# Altium schematic symbol library UCP.SchLib: 378 symbols (part 11 of 14)
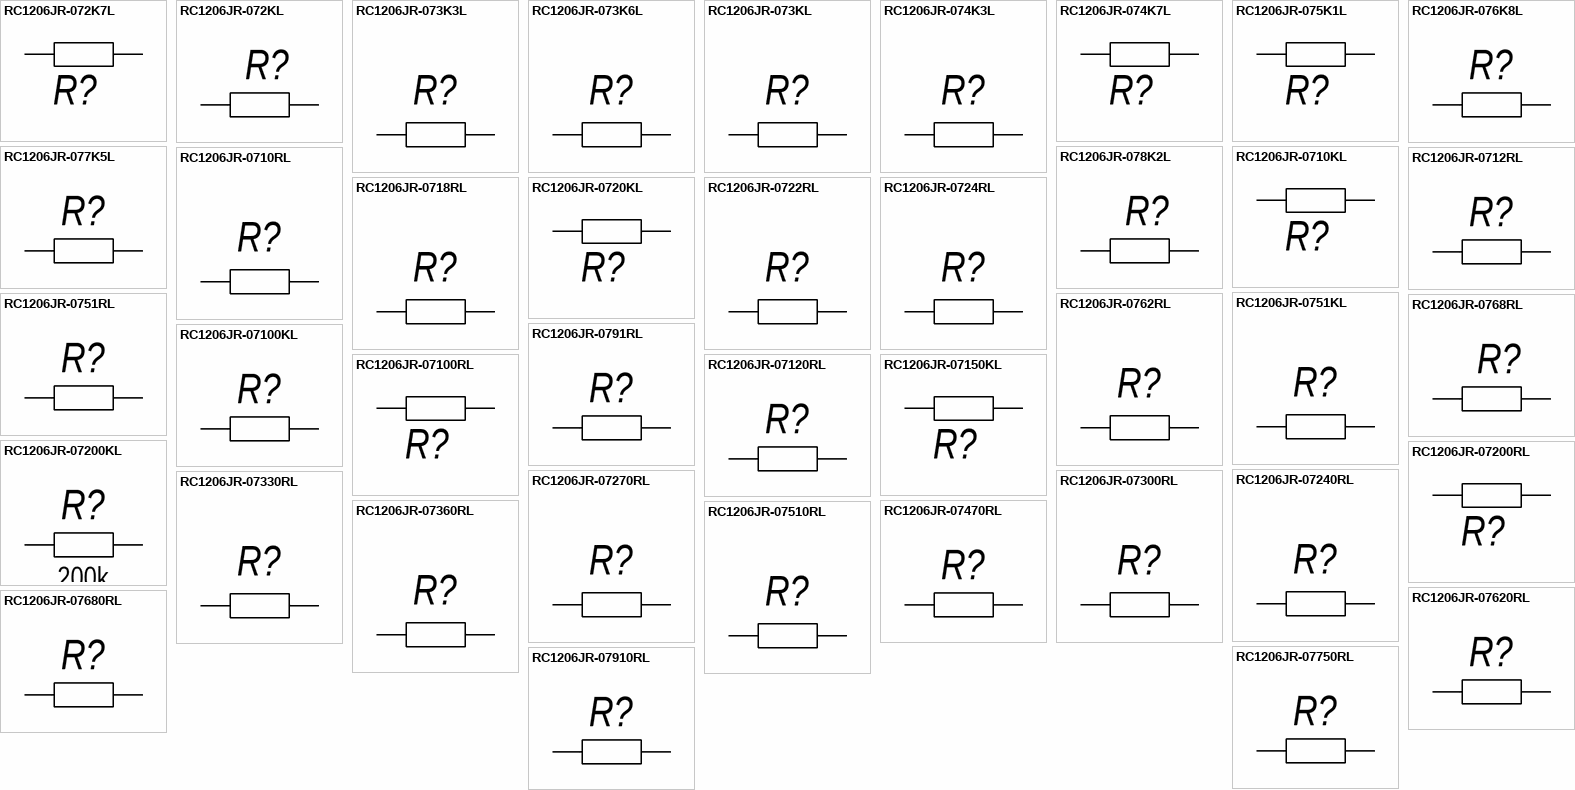
[diagram p34: symbols RC1206JR-072K7L to RC1206JR-07910RL]

## RC1206JR-0720KL
designator R?  (value not drawn)
Chip Resistor Surface Mount 1206 20 кОм; Manufacturer 1: Yageo; Resistance: 100R; Tolerance: 5%; Temperature Coefficient: 100ppm/°C; Power Rating: 250mW; Voltage Rating: 200V; Value: 20k; Manufacturer Part Number 1: RC1206JR-0720KL; RoHS: Yes; Category: Chip SMD Resistors; Stock 1: 16380; Pricing 1: 1=0,12500, 10=0,03000, 25=0,02400, 50=0,01700, 100=0,01100 (USD); Case/Package: 1206; Case Code (Metric): 3216; Case Code (Imperial): 1206; Size Code: 1206; Min Operating Temperature: -55°C; Max Operating Temperature: 155°C; Resistor Type: Thick Film; Packaging: Tape and Reel; Package Quantity: 5000; Number of Terminations: 2; Termination: SMD/SMT; Max Power Dissipation: 250mW; Series: RC1206; Resistance Tolerance: 5%; Construction: Rectangular; Length: 0.122inch; Width: 0.063inch; Height: 0.026inch; Depth: 1.6mm; REACH SVHC: Unknown; Lead Free: Lead Free; Military Standard: Not; RoHS Compliant: Yes; ComponentLink1URL: https://datasheet.ciiva.com/29181/402427-da-01-en-smd-widerstand-chip1206-100-ohm-29181432.pdf?src-supplier=Conrad; ComponentLink1Description: https://datasheet.ciiva.com/29181/402427-da-01-en-smd-widerstand-chip1206-100-ohm-29181432.pdf?src-supplier=Conrad; ComponentLink2URL: https://datasheet.ciiva.com/2458/pyu-rc1206-51-rohs-l-4-2458710.pdf?src-supplier=Digi-Key; ComponentLink2Description: https://datasheet.ciiva.com/2458/pyu-rc1206-51-rohs-l-4-2458710.pdf?src-supplier=Digi-Key; ComponentLink3URL: https://datasheet.ciiva.com/2458/pyu-rc1206-51-rohs-l-4-2458711.pdf?src-supplier=Digi-Key; ComponentLink3Description: https://datasheet.ciiva.com/2458/pyu-rc1206-51-rohs-l-4-2458711.pdf?src-supplier=Digi-Key; ComponentLink4URL: https://datasheet.ciiva.com/2458/pyu-rc1206-51-rohs-l-4-2458712.pdf?src-supplier=Digi-Key; ComponentLink4Description: https://datasheet.ciiva.com/2458/pyu-rc1206-51-rohs-l-4-2458712.pdf?src-supplier=Digi-Key; ComponentLink5URL: https://datasheet.ciiva.com/16772/pyu-rc1206-51-rohs-l-4-16772235.pdf?src-supplier=Future+Electronics; ComponentLink5Description: https://datasheet.ciiva.com/16772/pyu-rc1206-51-rohs-l-4-16772235.pdf?src-supplier=Future+Electronics; Supplier 1: Newark; Supplier Part Number 1: 82AH8588; Contact Plating: Tin,Matte; Voltage Rating (DC): 200V; Features: Moisture Resistant; Radiation Hardening: No; ComponentLink6URL: http://www.yageo.com/documents/recent/PYu-RC_Group_51_RoHS_L_9.pdf?src-supplier=Digi-Key; ComponentLink6Description: http://www.yageo.com/documents/recent/PYu-RC_Group_51_RoHS_L_9.pdf?src-supplier=Digi-Key; ComponentLink7URL: http://www.yageo.com.tw/exep/pages/download/literatures/PYu-R_INT-thick_7.pdf?src-supplier=Digi-Key; ComponentLink7Description: http://www.yageo.com.tw/exep/pages/download/literatures/PYu-R_INT-thick_7.pdf?src-supplier=Digi-Key; ComponentLink8URL: http://www.yageo.com/documents/recent/PYu-RC1206_51_RoHS_L_4.pdf?src-supplier=Mouser; ComponentLink8Description: http://www.yageo.com/documents/recent/PYu-RC1206_51_RoHS_L_4.pdf?src-supplier=Mouser; ComponentLink9URL: http://www.yageo.com/documents/recent/PYu-RC_Group_51_RoHS_L_2.pdf?src-supplier=Avnet; ComponentLink9Description: http://www.yageo.com/documents/recent/PYu-RC_Group_51_RoHS_L_2.pdf?src-supplier=Avnet; ComponentLink10URL: http://www.yageo.com/documents/recent/PYu-RC1206_51_RoHS_L-4.pdf?src-supplier=Future+Electronics; ComponentLink10Description: http://www.yageo.com/documents/recent/PYu-RC1206_51_RoHS_L-4.pdf?src-supplier=Future+Electronics; Mount: SMT; Type: Резистор
footprint RESC310X160X65L40N (Resistor, Chip; 3.10 mm L X 1.60 mm W X 0.65 mm H body)
pins: 1, 2

## RC1206JR-0722RL
designator R?  (value not drawn)
Chip Resistor Surface Mount 1206 22 Ом; Manufacturer 1: Yageo; Tolerance: 5%; Resistance: 22R; Temperature Coefficient: 100ppm/°C; Power Rating: 250mW; Voltage Rating: 200V; Value: 22; Manufacturer Part Number 1: RC1206JR-0722RL; RoHS: Yes; Category: Chip SMD Resistors; Stock 1: 377093; Pricing 1: 1=0,10000, 10=0,06300, 100=0,02580, 1000=0,01158, 2500=0,01005 (USD); Case/Package: 1206; Contact Plating: Tin,Matte; Case Code (Imperial): 1206; Case Code (Metric): 3216; Min Operating Temperature: -55°C; Max Operating Temperature: 155°C; Resistor Type: Thick Film; Package Quantity: 1; Packaging: Tape and Reel; Termination: SMD/SMT; Number of Terminations: 2; Max Power Dissipation: 250mW; Voltage Rating (DC): 200V; Features: Moisture Resistant; Series: RC; Construction: Rectangular; Length: 3.1mm; Width: 1.6mm; Height: 0.026inch; Depth: 1.6mm; Radiation Hardening: No; Military Standard: Not; Lead Free: Lead Free; RoHS Compliant: Yes; Supplier 1: Digi-Key; Working Voltage: 200V; Resistance Tolerance: 5%; Technology: THICK FILM; REACH SVHC: Unknown; ComponentLink1URL: https://datasheet.ciiva.com/29181/402346-da-01-en-smd-widerstand-chip1206-22-ohm-29181583.pdf?src-supplier=Conrad; ComponentLink1Description: https://datasheet.ciiva.com/29181/402346-da-01-en-smd-widerstand-chip1206-22-ohm-29181583.pdf?src-supplier=Conrad; ComponentLink2URL: https://datasheet.ciiva.com/16741/pyu-rc1206-51-rohs-l-4-16741109.pdf?src-supplier=Future+Electronics; ComponentLink2Description: https://datasheet.ciiva.com/16741/pyu-rc1206-51-rohs-l-4-16741109.pdf?src-supplier=Future+Electronics; ComponentLink3URL: https://datasheet.ciiva.com/7857/444357-7857469.pdf?src-supplier=Element14; ComponentLink3Description: https://datasheet.ciiva.com/7857/444357-7857469.pdf?src-supplier=Element14; ComponentLink4URL: https://datasheet.ciiva.com/7857/444357-7857470.pdf?src-supplier=Element14; ComponentLink4Description: https://datasheet.ciiva.com/7857/444357-7857470.pdf?src-supplier=Element14; Supplier Part Number 1: 311-22ERCT-ND; Mount: SMT; Type: Резистор
footprint RESC310X160X65L40N (Resistor, Chip; 3.10 mm L X 1.60 mm W X 0.65 mm H body)
pins: 1, 2

## RC1206JR-0724RL
designator R?  (value not drawn)
Chip Resistor Surface Mount 1206 24 Ом; Manufacturer 1: Yageo; Tolerance: 5%; Resistance: 24R; Temperature Coefficient: 100ppm/°C; Power Rating: 250mW; Voltage Rating: 200V; Value: 24; Supplier 1: Digi-Key; Supplier Part Number 1: 311-24ERCT-ND; Manufacturer Part Number 1: RC1206JR-0724RL; RoHS: Yes; Category: Chip SMD Resistors; Stock 1: 95989; Pricing 1: 1=0,10000, 10=0,06300, 100=0,02580, 1000=0,01158, 2500=0,01005 (USD); Case/Package: 1206; Contact Plating: Tin,Matte; Case Code (Imperial): 1206; Case Code (Metric): 3216; Min Operating Temperature: -55°C; Max Operating Temperature: 155°C; Resistor Type: Thick Film; Package Quantity: 1; Packaging: Tape and Reel; Termination: SMD/SMT; Number of Terminations: 2; Max Power Dissipation: 250mW; Voltage Rating (DC): 200V; Features: Moisture Resistant; Series: RC; Construction: Rectangular; Length: 3.1mm; Width: 1.6mm; Height: 0.026inch; Depth: 1.6mm; Radiation Hardening: No; Military Standard: Not; Lead Free: Lead Free; RoHS Compliant: Yes; ComponentLink1URL: https://datasheet.ciiva.com/2459/pyu-r-int-thick-7-2459115.pdf?src-supplier=Digi-Key; ComponentLink1Description: https://datasheet.ciiva.com/2459/pyu-r-int-thick-7-2459115.pdf?src-supplier=Digi-Key; ComponentLink2URL: https://datasheet.ciiva.com/16742/pyu-rc1206-51-rohs-l-4-16742507.pdf?src-supplier=Future+Electronics; ComponentLink2Description: https://datasheet.ciiva.com/16742/pyu-rc1206-51-rohs-l-4-16742507.pdf?src-supplier=Future+Electronics; ComponentLink3URL: https://datasheet.ciiva.com/2459/pyu-r-int-thick-7-2459116.pdf?src-supplier=Digi-Key; ComponentLink3Description: https://datasheet.ciiva.com/2459/pyu-r-int-thick-7-2459116.pdf?src-supplier=Digi-Key; ComponentLink4URL: https://datasheet.ciiva.com/2459/pyu-r-int-thick-7-2459117.pdf?src-supplier=Digi-Key; ComponentLink4Description: https://datasheet.ciiva.com/2459/pyu-r-int-thick-7-2459117.pdf?src-supplier=Digi-Key; Mount: SMT; Type: Резистор
footprint RESC310X160X65L40N (Resistor, Chip; 3.10 mm L X 1.60 mm W X 0.65 mm H body)
pins: 1, 2

## RC1206JR-0751KL
designator R?  (value not drawn)
Chip Resistor Surface Mount 1206 51 кОм; Manufacturer 1: Yageo; Resistance: 51kR; Tolerance: 5%; Temperature Coefficient: 100ppm/°C; Power Rating: 250mW; Voltage Rating: 200V; Value: 51k; Supplier 1: Digi-Key; Supplier Part Number 1: 311-51KERCT-ND; Manufacturer Part Number 1: RC1206JR-0751KL; RoHS: Yes; Category: Chip SMD Resistors; Stock 1: 45544; Pricing 1: 1=0,10000, 10=0,06300, 100=0,02580, 1000=0,01158, 2500=0,01005 (USD); Case/Package: 1206; Contact Plating: Tin,Matte; Case Code (Imperial): 1206; Case Code (Metric): 3216; Size Code: 1206; Min Operating Temperature: -55°C; Max Operating Temperature: 155°C; Resistor Type: Thick Film; Packaging: Tape and Reel; Termination: SMD/SMT; Voltage Rating (DC): 200V; Features: Moisture Resistant; Series: RC; Max Power Dissipation: 250mW; Number of Terminations: 2; Construction: Rectangular; Length: 3.1mm; Depth: 1.6mm; Radiation Hardening: No; Military Standard: Not; Lead Free: Lead Free; RoHS Compliant: Yes; ComponentLink1URL: https://datasheet.ciiva.com/17055/pyu-rc1206-51-rohs-l-4-17055983.pdf?src-supplier=Future+Electronics; ComponentLink1Description: https://datasheet.ciiva.com/17055/pyu-rc1206-51-rohs-l-4-17055983.pdf?src-supplier=Future+Electronics; Mount: SMT; Type: Резистор
footprint RESC310X160X65L40N (Resistor, Chip; 3.10 mm L X 1.60 mm W X 0.65 mm H body)
pins: 1, 2

## RC1206JR-0751RL
designator R?  (value not drawn)
Chip Resistor Surface Mount 1206 51 Ом; Manufacturer 1: Yageo; Tolerance: 5%; Resistance: 680R; Temperature Coefficient: 100ppm/°C; Power Rating: 250mW; Voltage Rating: 200V; Value: 51; Manufacturer 2: Yageo; Manufacturer Part Number 2: RC1206JR-07680RL; RoHS: Yes; Category: Chip SMD Resistors; Stock 2: 45000; Pricing 2: 1=0,01400, 5000=0,01400 (USD); Case/Package: 1206; Case Code (Metric): 3216; Case Code (Imperial): 1206; Size Code: 1206; Min Operating Temperature: -55°C; Max Operating Temperature: 155°C; Resistor Type: Thick Film; Packaging: Tape and Reel; Package Quantity: 1; Number of Terminations: 2; Termination: SMD/SMT; Max Power Dissipation: 250mW; Features: Moisture Resistant; Series: RC; Construction: Rectangular; Resistance Tolerance: 5%; Length: 0.122inch; Width: 0.063inch; Height: 0.026inch; Depth: 1.6mm; REACH SVHC: Unknown; Lead Free: Lead Free; Military Standard: Not; RoHS Compliant: Yes; ComponentLink1URL: https://datasheet.ciiva.com/29181/402524-da-01-en-smd-widerstand-chip1206-680-ohm-29181458.pdf?src-supplier=Conrad; ComponentLink1Description: https://datasheet.ciiva.com/29181/402524-da-01-en-smd-widerstand-chip1206-680-ohm-29181458.pdf?src-supplier=Conrad; ComponentLink2URL: https://datasheet.ciiva.com/7857/444357-7857525.pdf?src-supplier=Element14; ComponentLink2Description: https://datasheet.ciiva.com/7857/444357-7857525.pdf?src-supplier=Element14; ComponentLink3URL: https://datasheet.ciiva.com/7857/444357-7857526.pdf?src-supplier=Element14; ComponentLink3Description: https://datasheet.ciiva.com/7857/444357-7857526.pdf?src-supplier=Element14; ComponentLink4URL: https://datasheet.ciiva.com/17045/pyu-rc1206-51-rohs-l-4-17045767.pdf?src-supplier=Future+Electronics; ComponentLink4Description: https://datasheet.ciiva.com/17045/pyu-rc1206-51-rohs-l-4-17045767.pdf?src-supplier=Future+Electronics; ComponentLink5URL: https://datasheet.ciiva.com/2458/pyu-r-int-thick-7-2458809.pdf?src-supplier=Digi-Key; ComponentLink5Description: https://datasheet.ciiva.com/2458/pyu-r-int-thick-7-2458809.pdf?src-supplier=Digi-Key; ComponentLink6URL: https://datasheet.ciiva.com/2458/pyu-r-int-thick-7-2458810.pdf?src-supplier=Digi-Key; ComponentLink6Description: https://datasheet.ciiva.com/2458/pyu-r-int-thick-7-2458810.pdf?src-supplier=Digi-Key; ComponentLink7URL: https://datasheet.ciiva.com/2458/pyu-r-int-thick-7-2458811.pdf?src-supplier=Digi-Key; ComponentLink7Description: https://datasheet.ciiva.com/2458/pyu-r-int-thick-7-2458811.pdf?src-supplier=Digi-Key; Supplier 1: Digi-Key; Manufacturer Part Number 1: RC1206JR-0751RL; Stock 1: 243011; Pricing 1: 1=0,10000, 10=0,06300, 100=0,02580, 1000=0,01158, 2500=0,01005 (USD); Voltage Rating (DC): 200V; Working Voltage: 200V; Technology: THICK FILM; ComponentLink8URL: https://datasheet.ciiva.com/16741/pyu-rc1206-51-rohs-l-4-16741110.pdf?src-supplier=Future+Electronics; ComponentLink8Description: https://datasheet.ciiva.com/16741/pyu-rc1206-51-rohs-l-4-16741110.pdf?src-supplier=Future+Electronics; ComponentLink9URL: https://datasheet.ciiva.com/2520/pyu-r-int-thick-7-2520620.pdf?src-supplier=Digi-Key; ComponentLink9Description: https://datasheet.ciiva.com/2520/pyu-r-int-thick-7-2520620.pdf?src-supplier=Digi-Key; ComponentLink10URL: https://datasheet.ciiva.com/2520/pyu-r-int-thick-7-2520621.pdf?src-supplier=Digi-Key; ComponentLink10Description: https://datasheet.ciiva.com/2520/pyu-r-int-thick-7-2520621.pdf?src-supplier=Digi-Key; ComponentLink11URL: https://datasheet.ciiva.com/2520/pyu-r-int-thick-7-2520622.pdf?src-supplier=Digi-Key; ComponentLink11Description: https://datasheet.ciiva.com/2520/pyu-r-int-thick-7-2520622.pdf?src-supplier=Digi-Key; Mount: SMT; Type: Резистор
footprint RESC310X160X65L40N (Resistor, Chip; 3.10 mm L X 1.60 mm W X 0.65 mm H body)
pins: 1, 2

## RC1206JR-0762RL
designator R?  (value not drawn)
Chip Resistor Surface Mount 1206 62 Ом; Manufacturer 1: Yageo; Resistance: 62R; Tolerance: 5%; Temperature Coefficient: 100ppm/°C; Power Rating: 250mW; Voltage Rating: 200V; Value: 62; Supplier 1: Digi-Key; Supplier Part Number 1: 311-62ERCT-ND; Manufacturer Part Number 1: RC1206JR-0762RL; RoHS: Yes; Category: Chip SMD Resistors; Stock 1: 146069; Pricing 1: 1=0,10000, 10=0,06300, 100=0,02580, 1000=0,01158, 2500=0,01005 (USD); Case/Package: 1206; Contact Plating: Tin,Matte; Case Code (Metric): 3216; Case Code (Imperial): 1206; Size Code: 1206; Min Operating Temperature: -55°C; Max Operating Temperature: 155°C; Resistor Type: Thick Film; Package Quantity: 1; Packaging: Tape and Reel; Number of Terminations: 2; Termination: SMD/SMT; Max Power Dissipation: 250mW; Voltage Rating (DC): 200V; Features: Moisture Resistant; Series: RC; Construction: Rectangular; Length: 3.1mm; Width: 0.063inch; Height: 0.026inch; Depth: 1.6mm; Radiation Hardening: No; Military Standard: Not; Lead Free: Lead Free; RoHS Compliant: Yes; ComponentLink1URL: https://datasheet.ciiva.com/2510/pyu-r-int-thick-7-2510368.pdf?src-supplier=Digi-Key; ComponentLink1Description: https://datasheet.ciiva.com/2510/pyu-r-int-thick-7-2510368.pdf?src-supplier=Digi-Key; ComponentLink2URL: https://datasheet.ciiva.com/2510/pyu-r-int-thick-7-2510369.pdf?src-supplier=Digi-Key; ComponentLink2Description: https://datasheet.ciiva.com/2510/pyu-r-int-thick-7-2510369.pdf?src-supplier=Digi-Key; ComponentLink3URL: https://datasheet.ciiva.com/17052/pyu-rc1206-51-rohs-l-4-17052631.pdf?src-supplier=Future+Electronics; ComponentLink3Description: https://datasheet.ciiva.com/17052/pyu-rc1206-51-rohs-l-4-17052631.pdf?src-supplier=Future+Electronics; ComponentLink4URL: https://datasheet.ciiva.com/2510/pyu-r-int-thick-7-2510367.pdf?src-supplier=Digi-Key; ComponentLink4Description: https://datasheet.ciiva.com/2510/pyu-r-int-thick-7-2510367.pdf?src-supplier=Digi-Key; Mount: SMT; Type: Резистор
footprint RESC310X160X65L40N (Resistor, Chip; 3.10 mm L X 1.60 mm W X 0.65 mm H body)
pins: 1, 2

## RC1206JR-0768RL
designator R?  (value not drawn)
Chip Resistor Surface Mount 1206 68 Ом; Manufacturer 1: Yageo; Resistance: 68R; Power Rating: 250mW; Tolerance: 5%; Voltage Rating: 200V; Temperature Coefficient: 100ppm/°C; Value: 68; Supplier 1: Digi-Key; Supplier Part Number 1: 311-68ERCT-ND; Manufacturer Part Number 1: RC1206JR-0768RL; RoHS: Yes; Category: Chip SMD Resistors; Stock 1: 443898; Pricing 1: 1=0,10000, 10=0,06300, 100=0,02580, 1000=0,01158, 2500=0,01005 (USD); Case/Package: 1206; Case Code (Metric): 3216; Case Code (Imperial): 1206; Size Code: 1206; Min Operating Temperature: -55°C; Max Operating Temperature: 155°C; Package Quantity: 1; Packaging: Cut Tape; Resistor Type: Thick Film; Number of Terminations: 2; Termination: SMD/SMT; Max Power Dissipation: 250mW; Series: RC1206; Resistance Tolerance: 5%; Length: 0.122inch; Width: 0.063inch; Height: 0.026inch; REACH SVHC: Unknown; Lead Free: Lead Free; RoHS Compliant: Yes; ComponentLink1URL: https://datasheet.ciiva.com/2458/pyu-r-int-thick-7-2458960.pdf?src-supplier=Digi-Key; ComponentLink1Description: https://datasheet.ciiva.com/2458/pyu-r-int-thick-7-2458960.pdf?src-supplier=Digi-Key; ComponentLink2URL: https://datasheet.ciiva.com/2458/pyu-r-int-thick-7-2458961.pdf?src-supplier=Digi-Key; ComponentLink2Description: https://datasheet.ciiva.com/2458/pyu-r-int-thick-7-2458961.pdf?src-supplier=Digi-Key; ComponentLink3URL: https://datasheet.ciiva.com/7857/444357-7857529.pdf?src-supplier=Element14; ComponentLink3Description: https://datasheet.ciiva.com/7857/444357-7857529.pdf?src-supplier=Element14; ComponentLink4URL: https://datasheet.ciiva.com/7857/444357-7857530.pdf?src-supplier=Element14; ComponentLink4Description: https://datasheet.ciiva.com/7857/444357-7857530.pdf?src-supplier=Element14; ComponentLink5URL: https://datasheet.ciiva.com/2458/pyu-r-int-thick-7-2458959.pdf?src-supplier=Digi-Key; ComponentLink5Description: https://datasheet.ciiva.com/2458/pyu-r-int-thick-7-2458959.pdf?src-supplier=Digi-Key; Mount: SMT; Type: Резистор
footprint RESC310X160X65L40N (Resistor, Chip; 3.10 mm L X 1.60 mm W X 0.65 mm H body)
pins: 1, 2

## RC1206JR-0791RL
designator R?  (value not drawn)
Chip Resistor Surface Mount 1206 91 Ом; Tolerance: 5%; Resistance: 680R; Temperature Coefficient: 100ppm/°C; Power Rating: 250mW; Voltage Rating: 200V; Value: 91; Supplier 1: Digi-Key; Supplier Part Number 1: 311-680ERCT-ND; Supplier 2: Newark; Manufacturer 2: Yageo; Manufacturer Part Number 2: RC1206JR-07680RL; RoHS: Yes; Category: Chip SMD Resistors; Stock 2: 45000; Pricing 2: 1=0,01400, 5000=0,01400 (USD); Case/Package: 1206; Case Code (Metric): 3216; Case Code (Imperial): 1206; Size Code: 1206; Min Operating Temperature: -55°C; Max Operating Temperature: 155°C; Resistor Type: Thick Film; Packaging: Tape and Reel; Package Quantity: 1; Number of Terminations: 2; Termination: SMD/SMT; Max Power Dissipation: 250mW; Features: Moisture Resistant; Series: RC; Construction: Rectangular; Resistance Tolerance: 5%; Length: 0.122inch; Width: 0.063inch; Height: 0.026inch; Depth: 1.6mm; REACH SVHC: Unknown; Lead Free: Lead Free; Military Standard: Not; RoHS Compliant: Yes; ComponentLink1URL: https://datasheet.ciiva.com/29181/402524-da-01-en-smd-widerstand-chip1206-680-ohm-29181458.pdf?src-supplier=Conrad; ComponentLink1Description: https://datasheet.ciiva.com/29181/402524-da-01-en-smd-widerstand-chip1206-680-ohm-29181458.pdf?src-supplier=Conrad; ComponentLink2URL: https://datasheet.ciiva.com/7857/444357-7857525.pdf?src-supplier=Element14; ComponentLink2Description: https://datasheet.ciiva.com/7857/444357-7857525.pdf?src-supplier=Element14; ComponentLink3URL: https://datasheet.ciiva.com/7857/444357-7857526.pdf?src-supplier=Element14; ComponentLink3Description: https://datasheet.ciiva.com/7857/444357-7857526.pdf?src-supplier=Element14; ComponentLink4URL: https://datasheet.ciiva.com/17045/pyu-rc1206-51-rohs-l-4-17045767.pdf?src-supplier=Future+Electronics; ComponentLink4Description: https://datasheet.ciiva.com/17045/pyu-rc1206-51-rohs-l-4-17045767.pdf?src-supplier=Future+Electronics; ComponentLink5URL: https://datasheet.ciiva.com/2458/pyu-r-int-thick-7-2458809.pdf?src-supplier=Digi-Key; ComponentLink5Description: https://datasheet.ciiva.com/2458/pyu-r-int-thick-7-2458809.pdf?src-supplier=Digi-Key; ComponentLink6URL: https://datasheet.ciiva.com/2458/pyu-r-int-thick-7-2458810.pdf?src-supplier=Digi-Key; ComponentLink6Description: https://datasheet.ciiva.com/2458/pyu-r-int-thick-7-2458810.pdf?src-supplier=Digi-Key; ComponentLink7URL: https://datasheet.ciiva.com/2458/pyu-r-int-thick-7-2458811.pdf?src-supplier=Digi-Key; ComponentLink7Description: https://datasheet.ciiva.com/2458/pyu-r-int-thick-7-2458811.pdf?src-supplier=Digi-Key; Supplier Part Number 2: 12AC2296; Supplier 3: Newark; Supplier Part Number 3: 82AH8622; Manufacturer 3: Yageo; Manufacturer Part Number 3: RC1206JR-0791RL; Stock 3: 5450; Pricing 3: 1=0,12500, 10=0,03000, 25=0,02400, 50=0,01700, 100=0,01100 (USD); Contact Plating: Tin,Matte; Weight: 0.000571oz; Voltage Rating (DC): 200V; Radiation Hardening: No; ComponentLink8URL: https://datasheet.ciiva.com/2458/pyu-r-int-thick-7-2458690.pdf?src-supplier=Digi-Key; ComponentLink8Description: https://datasheet.ciiva.com/2458/pyu-r-int-thick-7-2458690.pdf?src-supplier=Digi-Key; ComponentLink9URL: https://datasheet.ciiva.com/2458/pyu-r-int-thick-7-2458691.pdf?src-supplier=Digi-Key; ComponentLink9Description: https://datasheet.ciiva.com/2458/pyu-r-int-thick-7-2458691.pdf?src-supplier=Digi-Key; ComponentLink10URL: https://datasheet.ciiva.com/2458/pyu-r-int-thick-7-2458689.pdf?src-supplier=Digi-Key; ComponentLink10Description: https://datasheet.ciiva.com/2458/pyu-r-int-thick-7-2458689.pdf?src-supplier=Digi-Key; ComponentLink11URL: https://datasheet.ciiva.com/17014/pyu-rc1206-51-rohs-l-4-17014926.pdf?src-supplier=Future+Electronics; ComponentLink11Description: https://datasheet.ciiva.com/17014/pyu-rc1206-51-rohs-l-4-17014926.pdf?src-supplier=Future+Electronics; Mount: SMT; Type: Резистор
footprint RESC310X160X65L40N (Resistor, Chip; 3.10 mm L X 1.60 mm W X 0.65 mm H body)
pins: 1, 2

## RC1206JR-07100KL
designator R?  (value not drawn)
Chip Resistor Surface Mount 1206 100 кОм; Manufacturer 1: Yageo; Power Rating: 250mW; Tolerance: 5%; Resistance: 100kR; Voltage Rating: 200V; Temperature Coefficient: 100ppm/°C; Value: 100k; Supplier 1: Digi-Key; Supplier Part Number 1: 311-100KERCT-ND; Manufacturer Part Number 1: RC1206JR-07100KL; RoHS: Yes; Category: Chip SMD Resistors; Stock 1: 192055; Pricing 1: 1=0,10000, 10=0,06300, 100=0,02580, 1000=0,01158, 2500=0,01005 (USD); Case/Package: 1206; Case Code (Imperial): 1206; Case Code (Metric): 3216; Size Code: 1206; Min Operating Temperature: -55°C; Max Operating Temperature: 155°C; Resistor Type: Thick Film; Packaging: Tape and Reel; Package Quantity: 1; Termination: SMD/SMT; Number of Terminations: 2; Max Power Dissipation: 250mW; Features: Moisture Resistant; Series: RC; Construction: Rectangular; Resistance Tolerance: 5%; Length: 0.122inch; Width: 0.063inch; Height: 0.026inch; Depth: 1.6mm; REACH SVHC: Unknown; Military Standard: Not; Lead Free: Lead Free; RoHS Compliant: Yes; ComponentLink1URL: https://datasheet.ciiva.com/29181/402788-da-01-en-smd-widerstand-chip1206-100-kohm-29181395.pdf?src-supplier=Conrad; ComponentLink1Description: https://datasheet.ciiva.com/29181/402788-da-01-en-smd-widerstand-chip1206-100-kohm-29181395.pdf?src-supplier=Conrad; ComponentLink2URL: https://datasheet.ciiva.com/2458/pyu-rc1206-51-rohs-l-4-2458650.pdf?src-supplier=Digi-Key; ComponentLink2Description: https://datasheet.ciiva.com/2458/pyu-rc1206-51-rohs-l-4-2458650.pdf?src-supplier=Digi-Key; ComponentLink3URL: https://datasheet.ciiva.com/2458/pyu-rc1206-51-rohs-l-4-2458651.pdf?src-supplier=Digi-Key; ComponentLink3Description: https://datasheet.ciiva.com/2458/pyu-rc1206-51-rohs-l-4-2458651.pdf?src-supplier=Digi-Key; ComponentLink4URL: https://datasheet.ciiva.com/2458/pyu-rc1206-51-rohs-l-4-2458652.pdf?src-supplier=Digi-Key; ComponentLink4Description: https://datasheet.ciiva.com/2458/pyu-rc1206-51-rohs-l-4-2458652.pdf?src-supplier=Digi-Key; ComponentLink5URL: https://datasheet.ciiva.com/16769/pyu-rc1206-51-rohs-l-4-16769645.pdf?src-supplier=Future+Electronics; ComponentLink5Description: https://datasheet.ciiva.com/16769/pyu-rc1206-51-rohs-l-4-16769645.pdf?src-supplier=Future+Electronics; ComponentLink6URL: https://datasheet.ciiva.com/7857/444357-7857423.pdf?src-supplier=Element14; ComponentLink6Description: https://datasheet.ciiva.com/7857/444357-7857423.pdf?src-supplier=Element14; Mount: SMT; Type: Резистор
footprint RESC310X160X65L40N (Resistor, Chip; 3.10 mm L X 1.60 mm W X 0.65 mm H body)
pins: 1, 2

## RC1206JR-07100RL
designator R?  (value not drawn)
Chip Resistor Surface Mount 1206 100 Ом; Manufacturer 1: Yageo; Resistance: 100R; Tolerance: 5%; Temperature Coefficient: 100ppm/°C; Power Rating: 250mW; Voltage Rating: 200V; Value: 100; Supplier 1: Digi-Key; Supplier Part Number 1: 311-100ERCT-ND; Manufacturer Part Number 1: RC1206JR-07100RL; RoHS: Yes; Category: Chip SMD Resistors; Stock 1: 1228470; Pricing 1: 1=0,10000, 10=0,06300, 100=0,02580, 1000=0,01158, 2500=0,01005 (USD); Case/Package: 1206; Case Code (Metric): 3216; Case Code (Imperial): 1206; Size Code: 1206; Min Operating Temperature: -55°C; Max Operating Temperature: 155°C; Resistor Type: Thick Film; Packaging: Tape and Reel; Package Quantity: 5000; Number of Terminations: 2; Termination: SMD/SMT; Max Power Dissipation: 250mW; Series: RC1206; Resistance Tolerance: 5%; Construction: Rectangular; Length: 0.122inch; Width: 0.063inch; Height: 0.026inch; Depth: 1.6mm; REACH SVHC: Unknown; Lead Free: Lead Free; Military Standard: Not; RoHS Compliant: Yes; ComponentLink1URL: https://datasheet.ciiva.com/29181/402427-da-01-en-smd-widerstand-chip1206-100-ohm-29181432.pdf?src-supplier=Conrad; ComponentLink1Description: https://datasheet.ciiva.com/29181/402427-da-01-en-smd-widerstand-chip1206-100-ohm-29181432.pdf?src-supplier=Conrad; ComponentLink2URL: https://datasheet.ciiva.com/2458/pyu-rc1206-51-rohs-l-4-2458710.pdf?src-supplier=Digi-Key; ComponentLink2Description: https://datasheet.ciiva.com/2458/pyu-rc1206-51-rohs-l-4-2458710.pdf?src-supplier=Digi-Key; ComponentLink3URL: https://datasheet.ciiva.com/2458/pyu-rc1206-51-rohs-l-4-2458711.pdf?src-supplier=Digi-Key; ComponentLink3Description: https://datasheet.ciiva.com/2458/pyu-rc1206-51-rohs-l-4-2458711.pdf?src-supplier=Digi-Key; ComponentLink4URL: https://datasheet.ciiva.com/2458/pyu-rc1206-51-rohs-l-4-2458712.pdf?src-supplier=Digi-Key; ComponentLink4Description: https://datasheet.ciiva.com/2458/pyu-rc1206-51-rohs-l-4-2458712.pdf?src-supplier=Digi-Key; ComponentLink5URL: https://datasheet.ciiva.com/16772/pyu-rc1206-51-rohs-l-4-16772235.pdf?src-supplier=Future+Electronics; ComponentLink5Description: https://datasheet.ciiva.com/16772/pyu-rc1206-51-rohs-l-4-16772235.pdf?src-supplier=Future+Electronics; Mount: SMT; Type: Резистор
footprint RESC310X160X65L40N (Resistor, Chip; 3.10 mm L X 1.60 mm W X 0.65 mm H body)
pins: 1, 2

## RC1206JR-07120RL
designator R?  (value not drawn)
Chip Resistor Surface Mount 1206 120 Ом; Resistance: 100R; Tolerance: 5%; Temperature Coefficient: 100ppm/°C; Power Rating: 250mW; Voltage Rating: 200V; Value: 120; Supplier 1: Digi-Key; Supplier Part Number 1: 311-120ERCT-ND; Supplier 2: Digi-Key; Manufacturer 2: Yageo; Manufacturer Part Number 2: RC1206JR-07100RL; RoHS: Yes; Category: Chip SMD Resistors; Stock 2: 1228470; Pricing 2: 1=0,10000, 10=0,06300, 100=0,02580, 1000=0,01158, 2500=0,01005 (USD); Case/Package: 1206; Case Code (Metric): 3216; Case Code (Imperial): 1206; Size Code: 1206; Min Operating Temperature: -55°C; Max Operating Temperature: 155°C; Resistor Type: Thick Film; Packaging: Tape and Reel; Package Quantity: 5000; Number of Terminations: 2; Termination: SMD/SMT; Max Power Dissipation: 250mW; Series: RC1206; Resistance Tolerance: 5%; Construction: Rectangular; Length: 0.122inch; Width: 0.063inch; Height: 0.026inch; Depth: 1.6mm; REACH SVHC: Unknown; Lead Free: Lead Free; Military Standard: Not; RoHS Compliant: Yes; ComponentLink1URL: https://datasheet.ciiva.com/29181/402427-da-01-en-smd-widerstand-chip1206-100-ohm-29181432.pdf?src-supplier=Conrad; ComponentLink1Description: https://datasheet.ciiva.com/29181/402427-da-01-en-smd-widerstand-chip1206-100-ohm-29181432.pdf?src-supplier=Conrad; ComponentLink2URL: https://datasheet.ciiva.com/2458/pyu-rc1206-51-rohs-l-4-2458710.pdf?src-supplier=Digi-Key; ComponentLink2Description: https://datasheet.ciiva.com/2458/pyu-rc1206-51-rohs-l-4-2458710.pdf?src-supplier=Digi-Key; ComponentLink3URL: https://datasheet.ciiva.com/2458/pyu-rc1206-51-rohs-l-4-2458711.pdf?src-supplier=Digi-Key; ComponentLink3Description: https://datasheet.ciiva.com/2458/pyu-rc1206-51-rohs-l-4-2458711.pdf?src-supplier=Digi-Key; ComponentLink4URL: https://datasheet.ciiva.com/2458/pyu-rc1206-51-rohs-l-4-2458712.pdf?src-supplier=Digi-Key; ComponentLink4Description: https://datasheet.ciiva.com/2458/pyu-rc1206-51-rohs-l-4-2458712.pdf?src-supplier=Digi-Key; ComponentLink5URL: https://datasheet.ciiva.com/16772/pyu-rc1206-51-rohs-l-4-16772235.pdf?src-supplier=Future+Electronics; ComponentLink5Description: https://datasheet.ciiva.com/16772/pyu-rc1206-51-rohs-l-4-16772235.pdf?src-supplier=Future+Electronics; Supplier Part Number 2: 311-100ERCT-ND; Mount: SMT; Type: Резистор
footprint RESC310X160X65L40N (Resistor, Chip; 3.10 mm L X 1.60 mm W X 0.65 mm H body)
pins: 1, 2

## RC1206JR-07150KL
designator R?  (value not drawn)
Chip Resistor Surface Mount 1206 150 кОм; Manufacturer 1: Yageo; Power Rating: 250mW; Tolerance: 5%; Voltage Rating: 200V; Resistance: 150kR; Temperature Coefficient: 100ppm/°C; Value: 150k; Supplier 1: Digi-Key; Supplier Part Number 1: 311-150KERCT-ND; Manufacturer Part Number 1: RC1206JR-07150KL; RoHS: Yes; Category: Chip SMD Resistors; Stock 1: 3922; Pricing 1: 1=0,10000, 10=0,06300, 100=0,02580, 1000=0,01158, 2500=0,01005 (USD); Case/Package: 1206; Number of Pins: 2; Case Code (Imperial): 1206; Case Code (Metric): 3216; Size Code: 1206; Min Operating Temperature: -55°C; Max Operating Temperature: 155°C; Voltage Rating (DC): 200V; Packaging: Tape and Reel; Termination: SMD/SMT; Resistor Type: Thick Film; Features: Moisture Resistant; Series: RC; Max Power Dissipation: 250mW; Number of Terminations: 2; Construction: Rectangular; Resistance Tolerance: 5%; Length: 3.1mm; Width: 1.6mm; Height: 0.55mm; Depth: 1.6mm; REACH SVHC: No SVHC; Military Standard: Not; Lead Free: Lead Free; RoHS Compliant: Yes; ComponentLink1URL: https://datasheet.ciiva.com/16746/pyu-rc1206-51-rohs-l-4-16746876.pdf?src-supplier=Future+Electronics; ComponentLink1Description: https://datasheet.ciiva.com/16746/pyu-rc1206-51-rohs-l-4-16746876.pdf?src-supplier=Future+Electronics; ComponentLink2URL: https://datasheet.ciiva.com/7857/444357-7857439.pdf?src-supplier=Element14; ComponentLink2Description: https://datasheet.ciiva.com/7857/444357-7857439.pdf?src-supplier=Element14; Mount: SMT; Type: Резистор
footprint RESC310X160X65L40N (Resistor, Chip; 3.10 mm L X 1.60 mm W X 0.65 mm H body)
pins: 1, 2

## RC1206JR-07200KL
designator R?  value 200k  (hidden comment: RC1206JR-07200KL)
Chip Resistor Surface Mount 1206 200 кОм; Manufacturer 1: Yageo; Resistance: 200kR; Power Rating: 250mW; Tolerance: 5%; Temperature Coefficient: 100ppm/°C; Voltage Rating (DC): 400V; Supplier 1: Arrow Electronics; Supplier Part Number 1: RC1206JR-07200KL; Manufacturer Part Number 1: RC1206JR-07200KL; RoHS 1: Yes; Category: Chip SMD Resistors; Stock 1: 45000; Pricing 1: 5000=0,00440 (USD); Case/Package: 1206; Case Code (Metric): 3216; Case Code (Imperial): 1206; Size Code: 1206; Min Operating Temperature: -55°C; Max Operating Temperature: 155°C; Package Quantity: 1; Packaging: Tape and Reel; Resistor Type: Thick Film; Number of Terminations: 2; Max Power Dissipation: 250mW; Features: Moisture Resistant; Series: RC; Construction: Rectangular; Length: 0.122inch; Width: 0.063inch; Height: 0.026inch; Depth: 1.6mm; Military Standard: Not; Lead Free: Lead Free; RoHS Compliant: Yes; ComponentLink1URL: https://datasheet.ciiva.com/2520/pyu-r-int-thick-7-2520645.pdf?src-supplier=Digi-Key; ComponentLink1Description: https://datasheet.ciiva.com/2520/pyu-r-int-thick-7-2520645.pdf?src-supplier=Digi-Key; ComponentLink2URL: https://datasheet.ciiva.com/2520/pyu-r-int-thick-7-2520646.pdf?src-supplier=Digi-Key; ComponentLink2Description: https://datasheet.ciiva.com/2520/pyu-r-int-thick-7-2520646.pdf?src-supplier=Digi-Key; ComponentLink3URL: https://datasheet.ciiva.com/16746/pyu-rc1206-51-rohs-l-4-16746043.pdf?src-supplier=Future+Electronics; ComponentLink3Description: https://datasheet.ciiva.com/16746/pyu-rc1206-51-rohs-l-4-16746043.pdf?src-supplier=Future+Electronics; Mount: SMT; Type: Резистор
footprint RESC310X160X65L40N (Resistor, Chip; 3.10 mm L X 1.60 mm W X 0.65 mm H body)
pins: 1, 2

## RC1206JR-07200RL
designator R?  (value not drawn)
Chip Resistor Surface Mount 1206 200 Ом; Manufacturer 1: Yageo; Manufacturer Part Number 1: RC1206JR-07100RL; Resistance: 100R; Tolerance: 5%; Temperature Coefficient: 100ppm/°C; Power Rating: 250mW; Voltage Rating: 200V; Value: 200; RoHS: Yes; Category: Chip SMD Resistors; Stock 1: 1228470; Pricing 1: 1=0,10000, 10=0,06300, 100=0,02580, 1000=0,01158, 2500=0,01005 (USD); Case/Package: 1206; Case Code (Metric): 3216; Case Code (Imperial): 1206; Size Code: 1206; Min Operating Temperature: -55°C; Max Operating Temperature: 155°C; Resistor Type: Thick Film; Packaging: Tape and Reel; Package Quantity: 5000; Number of Terminations: 2; Termination: SMD/SMT; Max Power Dissipation: 250mW; Series: RC1206; Resistance Tolerance: 5%; Construction: Rectangular; Length: 0.122inch; Width: 0.063inch; Height: 0.026inch; Depth: 1.6mm; REACH SVHC: Unknown; Lead Free: Lead Free; Military Standard: Not; RoHS Compliant: Yes; ComponentLink1URL: https://datasheet.ciiva.com/29181/402427-da-01-en-smd-widerstand-chip1206-100-ohm-29181432.pdf?src-supplier=Conrad; ComponentLink1Description: https://datasheet.ciiva.com/29181/402427-da-01-en-smd-widerstand-chip1206-100-ohm-29181432.pdf?src-supplier=Conrad; ComponentLink2URL: https://datasheet.ciiva.com/2458/pyu-rc1206-51-rohs-l-4-2458710.pdf?src-supplier=Digi-Key; ComponentLink2Description: https://datasheet.ciiva.com/2458/pyu-rc1206-51-rohs-l-4-2458710.pdf?src-supplier=Digi-Key; ComponentLink3URL: https://datasheet.ciiva.com/2458/pyu-rc1206-51-rohs-l-4-2458711.pdf?src-supplier=Digi-Key; ComponentLink3Description: https://datasheet.ciiva.com/2458/pyu-rc1206-51-rohs-l-4-2458711.pdf?src-supplier=Digi-Key; ComponentLink4URL: https://datasheet.ciiva.com/2458/pyu-rc1206-51-rohs-l-4-2458712.pdf?src-supplier=Digi-Key; ComponentLink4Description: https://datasheet.ciiva.com/2458/pyu-rc1206-51-rohs-l-4-2458712.pdf?src-supplier=Digi-Key; ComponentLink5URL: https://datasheet.ciiva.com/16772/pyu-rc1206-51-rohs-l-4-16772235.pdf?src-supplier=Future+Electronics; ComponentLink5Description: https://datasheet.ciiva.com/16772/pyu-rc1206-51-rohs-l-4-16772235.pdf?src-supplier=Future+Electronics; Mount: SMT; Type: Резистор
footprint RESC310X160X65L40N (Resistor, Chip; 3.10 mm L X 1.60 mm W X 0.65 mm H body)
pins: 1, 2

## RC1206JR-07240RL
designator R?  (value not drawn)
Chip Resistor Surface Mount 1206 240 Ом; Manufacturer 1: Yageo; Tolerance: 5%; Power Rating: 250mW; Resistance: 240R; Voltage Rating: 200V; Temperature Coefficient: 100ppm/°C; Value: 240; Supplier 1: Digi-Key; Supplier Part Number 1: 311-240ERCT-ND; Manufacturer Part Number 1: RC1206JR-07240RL; RoHS: Yes; Category: Chip SMD Resistors; Stock 1: 20201; Pricing 1: 1=0,10000, 10=0,06300, 100=0,02580, 1000=0,01158, 2500=0,01005 (USD); Case/Package: 1206; Case Code (Imperial): 1206; Case Code (Metric): 3216; Size Code: 1206; Min Operating Temperature: -55°C; Max Operating Temperature: 155°C; Packaging: Tape and Reel; Package Quantity: 5000; Termination: SMD/SMT; Resistor Type: Thick Film; Voltage Rating (DC): 200V; Features: Moisture Resistant; Series: RC; Max Power Dissipation: 250mW; Number of Terminations: 2; Construction: Rectangular; Length: 3.1mm; Width: 1.6mm; Height: 0.55mm; Depth: 1.6mm; Military Standard: Not; Lead Free: Lead Free; RoHS Compliant: Yes; ComponentLink1URL: http://www.mouser.com/ds/2/447/PYu-RC1206_51_RoHS_L-4-349080.pdf?src-supplier=Mouser; ComponentLink1Description: http://www.mouser.com/ds/2/447/PYu-RC1206_51_RoHS_L-4-349080.pdf?src-supplier=Mouser; ComponentLink2URL: http://components.arrow.com/part/dataview/0323_03543372?src-supplier=Arrow+Europe; ComponentLink2Description: http://components.arrow.com/part/dataview/0323_03543372?src-supplier=Arrow+Europe; ComponentLink3URL: http://www.yageo.com/documents/recent/PYu-RC1206_51_RoHS_L-4.pdf?src-supplier=Future+Electronics; ComponentLink3Description: http://www.yageo.com/documents/recent/PYu-RC1206_51_RoHS_L-4.pdf?src-supplier=Future+Electronics; ComponentLink4URL: http://www.yageo.com/documents/recent/PYu-RC_Group_51_RoHS_L_9.pdf?src-supplier=Digi-Key; ComponentLink4Description: http://www.yageo.com/documents/recent/PYu-RC_Group_51_RoHS_L_9.pdf?src-supplier=Digi-Key; ComponentLink5URL: http://www.yageo.com/documents/recent/PYu-RC_Group_51_RoHS_L_10.pdf?src-supplier=Digi-Key; ComponentLink5Description: http://www.yageo.com/documents/recent/PYu-RC_Group_51_RoHS_L_10.pdf?src-supplier=Digi-Key; ComponentLink6URL: http://www.yageo.com.tw/exep/pages/download/literatures/PYu-R_INT-thick_7.pdf?src-supplier=Digi-Key; ComponentLink6Description: http://www.yageo.com.tw/exep/pages/download/literatures/PYu-R_INT-thick_7.pdf?src-supplier=Digi-Key; Mount: SMT; Type: Резистор
footprint RESC310X160X65L40N (Resistor, Chip; 3.10 mm L X 1.60 mm W X 0.65 mm H body)
pins: 1, 2

## RC1206JR-07270RL
designator R?  (value not drawn)
Chip Resistor Surface Mount 1206 270 Ом; Manufacturer 1: Yageo; Resistance: 270R; Tolerance: 5%; Temperature Coefficient: 100ppm/°C; Power Rating: 250mW; Voltage Rating: 200V; Value: 270; Supplier 1: Digi-Key; Supplier Part Number 1: 311-270ERCT-ND; Manufacturer Part Number 1: RC1206JR-07270RL; RoHS: Yes; Category: Chip SMD Resistors; Stock 1: 33; Pricing 1: 1=0,10000, 10=0,06300, 100=0,02580, 1000=0,01158, 2500=0,01005 (USD); Case/Package: 1206; Contact Plating: Tin,Matte; Case Code (Imperial): 1206; Case Code (Metric): 3216; Size Code: 1206; Min Operating Temperature: -55°C; Max Operating Temperature: 155°C; Resistor Type: Thick Film; Packaging: Tape and Reel; Termination: SMD/SMT; Features: Moisture Resistant; Series: RC; Max Power Dissipation: 250mW; Number of Terminations: 2; Resistance Tolerance: 5%; Construction: Rectangular; Length: 3.1mm; Depth: 1.6mm; Radiation Hardening: No; REACH SVHC: Unknown; Military Standard: Not; Lead Free: Lead Free; RoHS Compliant: Yes; ComponentLink1URL: https://datasheet.ciiva.com/29181/402478-da-01-en-smd-widerstand-chip1206-270-ohm-29181445.pdf?src-supplier=Conrad; ComponentLink1Description: https://datasheet.ciiva.com/29181/402478-da-01-en-smd-widerstand-chip1206-270-ohm-29181445.pdf?src-supplier=Conrad; Mount: SMT; Type: Резистор
footprint RESC310X160X65L40N (Resistor, Chip; 3.10 mm L X 1.60 mm W X 0.65 mm H body)
pins: 1, 2

## RC1206JR-07300RL
designator R?  (value not drawn)
Chip Resistor Surface Mount 1206 300 Ом; Manufacturer 1: Yageo; Power Rating: 250mW; Resistance: 300R; Tolerance: 5%; Voltage Rating: 200V; Temperature Coefficient: 100ppm/°C; Voltage Rating (DC): 400V; Value: 300; Supplier 1: Digi-Key; Supplier Part Number 1: 311-300ERCT-ND; Manufacturer Part Number 1: RC1206JR-07300RL; RoHS: Yes; Category: Chip SMD Resistors; Stock 1: 38660; Pricing 1: 1=0,10000, 10=0,06300, 100=0,02580, 1000=0,01158, 2500=0,01005 (USD); Case/Package: 1206; Case Code (Imperial): 1206; Case Code (Metric): 3216; Size Code: 1206; Min Operating Temperature: -55°C; Max Operating Temperature: 155°C; Packaging: Tape and Reel; Package Quantity: 5000; Termination: SMD/SMT; Resistor Type: Thick Film; Features: Moisture Resistant; Series: RC; Max Power Dissipation: 250mW; Number of Terminations: 2; Construction: Rectangular; Length: 3.1mm; Width: 1.6mm; Height: 0.55mm; Depth: 1.6mm; Military Standard: Not; Lead Free: Lead Free; RoHS Compliant: Yes; ComponentLink1URL: https://datasheet.ciiva.com/17197/pyu-rc1206-51-rohs-l-4-17197503.pdf?src-supplier=Future+Electronics; ComponentLink1Description: https://datasheet.ciiva.com/17197/pyu-rc1206-51-rohs-l-4-17197503.pdf?src-supplier=Future+Electronics; Mount: SMT; Type: Резистор
footprint RESC310X160X65L40N (Resistor, Chip; 3.10 mm L X 1.60 mm W X 0.65 mm H body)
pins: 1, 2

## RC1206JR-07330RL
designator R?  (value not drawn)
Chip Resistor Surface Mount 1206 330 Ом; Manufacturer 1: Yageo; Tolerance: 5%; Resistance: 330R; Temperature Coefficient: 100ppm/°C; Power Rating: 250mW; Voltage Rating: 200V; Value: 330; Supplier 1: Digi-Key; Supplier Part Number 1: 311-330ERCT-ND; Manufacturer Part Number 1: RC1206JR-07330RL; RoHS: Yes; Category: Chip SMD Resistors; Stock 1: 487201; Pricing 1: 1=0,10000, 10=0,06300, 100=0,02580, 1000=0,01158, 2500=0,01005 (USD); Case/Package: 1206; Case Code (Imperial): 1206; Case Code (Metric): 3216; Size Code: 1206; Min Operating Temperature: -55°C; Max Operating Temperature: 155°C; Resistor Type: Thick Film; Packaging: Tape and Reel; Package Quantity: 1; Termination: SMD/SMT; Number of Terminations: 2; Max Power Dissipation: 250mW; Features: Moisture Resistant; Series: RC; Resistance Tolerance: 5%; Construction: Rectangular; Length: 0.122inch; Width: 0.063inch; Height: 0.026inch; Depth: 1.6mm; REACH SVHC: Unknown; Lead Free: Lead Free; Military Standard: Not; RoHS Compliant: Yes; ComponentLink1URL: https://datasheet.ciiva.com/29181/402486-da-01-en-smd-widerstand-chip1206-330-ohm-29181448.pdf?src-supplier=Conrad; ComponentLink1Description: https://datasheet.ciiva.com/29181/402486-da-01-en-smd-widerstand-chip1206-330-ohm-29181448.pdf?src-supplier=Conrad; ComponentLink2URL: https://datasheet.ciiva.com/2458/pyu-r-int-thick-7-2458645.pdf?src-supplier=Digi-Key; ComponentLink2Description: https://datasheet.ciiva.com/2458/pyu-r-int-thick-7-2458645.pdf?src-supplier=Digi-Key; ComponentLink3URL: https://datasheet.ciiva.com/2458/pyu-r-int-thick-7-2458646.pdf?src-supplier=Digi-Key; ComponentLink3Description: https://datasheet.ciiva.com/2458/pyu-r-int-thick-7-2458646.pdf?src-supplier=Digi-Key; ComponentLink4URL: https://datasheet.ciiva.com/16747/pyu-rc1206-51-rohs-l-4-16747287.pdf?src-supplier=Future+Electronics; ComponentLink4Description: https://datasheet.ciiva.com/16747/pyu-rc1206-51-rohs-l-4-16747287.pdf?src-supplier=Future+Electronics; ComponentLink5URL: https://datasheet.ciiva.com/7857/444357-7857485.pdf?src-supplier=Element14; ComponentLink5Description: https://datasheet.ciiva.com/7857/444357-7857485.pdf?src-supplier=Element14; ComponentLink6URL: https://datasheet.ciiva.com/7857/444357-7857486.pdf?src-supplier=Element14; ComponentLink6Description: https://datasheet.ciiva.com/7857/444357-7857486.pdf?src-supplier=Element14; ComponentLink7URL: https://datasheet.ciiva.com/2458/pyu-r-int-thick-7-2458644.pdf?src-supplier=Digi-Key; ComponentLink7Description: https://datasheet.ciiva.com/2458/pyu-r-int-thick-7-2458644.pdf?src-supplier=Digi-Key; Mount: SMT; Type: Резистор
footprint RESC310X160X65L40N (Resistor, Chip; 3.10 mm L X 1.60 mm W X 0.65 mm H body)
pins: 1, 2

## RC1206JR-07360RL
designator R?  (value not drawn)
Chip Resistor Surface Mount 1206 360 Ом; Tolerance: 5%; Resistance: 360R; Temperature Coefficient: 100ppm/°C; Power Rating: 250mW; Voltage Rating: 200V; Value: 360; RoHS: Yes; Category: Chip SMD Resistors; Case/Package: 1206; Case Code (Imperial): 1206; Case Code (Metric): 3216; Size Code: 1206; Min Operating Temperature: -55°C; Max Operating Temperature: 155°C; Resistor Type: Thick Film; Packaging: Tape and Reel; Package Quantity: 1; Termination: SMD/SMT; Number of Terminations: 2; Max Power Dissipation: 250mW; Features: Moisture Resistant; Series: RC; Resistance Tolerance: 5%; Construction: Rectangular; Length: 0.122inch; Width: 0.063inch; Height: 0.026inch; Depth: 1.6mm; REACH SVHC: Unknown; Lead Free: Lead Free; Military Standard: Not; RoHS Compliant: Yes; Supplier 1: Digi-Key; Supplier Part Number 1: 311-360ERCT-ND; Mount: SMT; Type: Резистор
footprint RESC310X160X65L40N (Resistor, Chip; 3.10 mm L X 1.60 mm W X 0.65 mm H body)
pins: 1, 2

## RC1206JR-07470RL
designator R?  (value not drawn)
Chip Resistor Surface Mount 1206 470 Ом; Manufacturer 1: Yageo; Manufacturer Part Number 1: RC1206JR-07330RL; Tolerance: 5%; Resistance: 330R; Temperature Coefficient: 100ppm/°C; Power Rating: 250mW; Voltage Rating: 200V; Value: 470; Supplier 1: Digi-Key; Supplier Part Number 1: 311-330ERCT-ND; RoHS: Yes; Category: Chip SMD Resistors; Stock 1: 487201; Pricing 1: 1=0,10000, 10=0,06300, 100=0,02580, 1000=0,01158, 2500=0,01005 (USD); Case/Package: 1206; Case Code (Imperial): 1206; Case Code (Metric): 3216; Size Code: 1206; Min Operating Temperature: -55°C; Max Operating Temperature: 155°C; Resistor Type: Thick Film; Packaging: Tape and Reel; Package Quantity: 1; Termination: SMD/SMT; Number of Terminations: 2; Max Power Dissipation: 250mW; Features: Moisture Resistant; Series: RC; Resistance Tolerance: 5%; Construction: Rectangular; Length: 0.122inch; Width: 0.063inch; Height: 0.026inch; Depth: 1.6mm; REACH SVHC: Unknown; Lead Free: Lead Free; Military Standard: Not; RoHS Compliant: Yes; ComponentLink1URL: https://datasheet.ciiva.com/29181/402486-da-01-en-smd-widerstand-chip1206-330-ohm-29181448.pdf?src-supplier=Conrad; ComponentLink1Description: https://datasheet.ciiva.com/29181/402486-da-01-en-smd-widerstand-chip1206-330-ohm-29181448.pdf?src-supplier=Conrad; ComponentLink2URL: https://datasheet.ciiva.com/2458/pyu-r-int-thick-7-2458645.pdf?src-supplier=Digi-Key; ComponentLink2Description: https://datasheet.ciiva.com/2458/pyu-r-int-thick-7-2458645.pdf?src-supplier=Digi-Key; ComponentLink3URL: https://datasheet.ciiva.com/2458/pyu-r-int-thick-7-2458646.pdf?src-supplier=Digi-Key; ComponentLink3Description: https://datasheet.ciiva.com/2458/pyu-r-int-thick-7-2458646.pdf?src-supplier=Digi-Key; ComponentLink4URL: https://datasheet.ciiva.com/16747/pyu-rc1206-51-rohs-l-4-16747287.pdf?src-supplier=Future+Electronics; ComponentLink4Description: https://datasheet.ciiva.com/16747/pyu-rc1206-51-rohs-l-4-16747287.pdf?src-supplier=Future+Electronics; ComponentLink5URL: https://datasheet.ciiva.com/7857/444357-7857485.pdf?src-supplier=Element14; ComponentLink5Description: https://datasheet.ciiva.com/7857/444357-7857485.pdf?src-supplier=Element14; ComponentLink6URL: https://datasheet.ciiva.com/7857/444357-7857486.pdf?src-supplier=Element14; ComponentLink6Description: https://datasheet.ciiva.com/7857/444357-7857486.pdf?src-supplier=Element14; ComponentLink7URL: https://datasheet.ciiva.com/2458/pyu-r-int-thick-7-2458644.pdf?src-supplier=Digi-Key; ComponentLink7Description: https://datasheet.ciiva.com/2458/pyu-r-int-thick-7-2458644.pdf?src-supplier=Digi-Key; Supplier 2: Digi-Key; Manufacturer 2: Yageo; Manufacturer Part Number 2: RC1206JR-07470RL; Stock 2: 181078; Pricing 2: 1=0,10000, 10=0,06300, 100=0,02580, 1000=0,01158, 2500=0,01005 (USD); Contact Plating: Tin,Matte; Radiation Hardening: No; ComponentLink8URL: https://datasheet.ciiva.com/16746/pyu-rc1206-51-rohs-l-4-16746299.pdf?src-supplier=Future+Electronics; ComponentLink8Description: https://datasheet.ciiva.com/16746/pyu-rc1206-51-rohs-l-4-16746299.pdf?src-supplier=Future+Electronics; Supplier Part Number 2: 311-470ERCT-ND; Mount: SMT; Type: Резистор
footprint RESC310X160X65L40N (Resistor, Chip; 3.10 mm L X 1.60 mm W X 0.65 mm H body)
pins: 1, 2

## RC1206JR-07510RL
designator R?  (value not drawn)
Chip Resistor Surface Mount 1206 510 Ом; Manufacturer 1: Yageo; Resistance: 510R; Tolerance: 5%; Temperature Coefficient: 100ppm/°C; Power Rating: 250mW; Voltage Rating: 200V; Value: 510; Supplier 1: Digi-Key; Supplier Part Number 1: 311-510ERCT-ND; Manufacturer Part Number 1: RC1206JR-07510RL; RoHS: Yes; Category: Chip SMD Resistors; Stock 1: 345474; Pricing 1: 1=0,10000, 10=0,06300, 100=0,02580, 1000=0,01158, 2500=0,01005 (USD); Case/Package: 1206; Contact Plating: Tin,Matte; Case Code (Metric): 3216; Case Code (Imperial): 1206; Size Code: 1206; Min Operating Temperature: -55°C; Max Operating Temperature: 155°C; Resistor Type: Thick Film; Package Quantity: 5000; Packaging: Tape and Reel; Number of Terminations: 2; Termination: SMD/SMT; Max Power Dissipation: 250mW; Voltage Rating (DC): 200V; Features: Moisture Resistant; Series: RC; Construction: Rectangular; Length: 0.122inch; Width: 0.063inch; Height: 0.026inch; Depth: 1.6mm; Radiation Hardening: No; Military Standard: Not; Lead Free: Lead Free; RoHS Compliant: Yes; ComponentLink1URL: http://www.mouser.com/ds/2/447/PYu-RC1206_51_RoHS_L-4-349080.pdf?src-supplier=Mouser; ComponentLink1Description: http://www.mouser.com/ds/2/447/PYu-RC1206_51_RoHS_L-4-349080.pdf?src-supplier=Mouser; ComponentLink2URL: http://components.arrow.com/part/dataview/0323_03537269?src-supplier=Arrow+Europe; ComponentLink2Description: http://components.arrow.com/part/dataview/0323_03537269?src-supplier=Arrow+Europe; ComponentLink3URL: http://www.yageo.com.tw/exep/pages/download/literatures/PYu-R_INT-thick_7.pdf?src-supplier=Digi-Key; ComponentLink3Description: http://www.yageo.com.tw/exep/pages/download/literatures/PYu-R_INT-thick_7.pdf?src-supplier=Digi-Key; ComponentLink4URL: http://www.yageo.com/documents/recent/PYu-RC1206_51_RoHS_L-4.pdf?src-supplier=Future+Electronics; ComponentLink4Description: http://www.yageo.com/documents/recent/PYu-RC1206_51_RoHS_L-4.pdf?src-supplier=Future+Electronics; ComponentLink5URL: http://www.yageo.com/documents/recent/PYu-RC_Group_51_RoHS_L_2.pdf?src-supplier=Avnet; ComponentLink5Description: http://www.yageo.com/documents/recent/PYu-RC_Group_51_RoHS_L_2.pdf?src-supplier=Avnet; ComponentLink6URL: http://www.yageo.com/documents/recent/PYu-RC1206_51_RoHS_L_5.pdf?src-supplier=Avnet+Europe; ComponentLink6Description: http://www.yageo.com/documents/recent/PYu-RC1206_51_RoHS_L_5.pdf?src-supplier=Avnet+Europe; ComponentLink7URL: http://www.yageo.com/documents/recent/PYu-RC_Group_51_RoHS_L_10.pdf?src-supplier=Digi-Key; ComponentLink7Description: http://www.yageo.com/documents/recent/PYu-RC_Group_51_RoHS_L_10.pdf?src-supplier=Digi-Key; Mount: SMT; Type: Резистор
footprint RESC310X160X65L40N (Resistor, Chip; 3.10 mm L X 1.60 mm W X 0.65 mm H body)
pins: 1, 2